# Altium schematic symbol library PCB_Project1.SCHLIB: 6 symbols
Pins are listed as number, name and electrical type; pins without a type are passive.

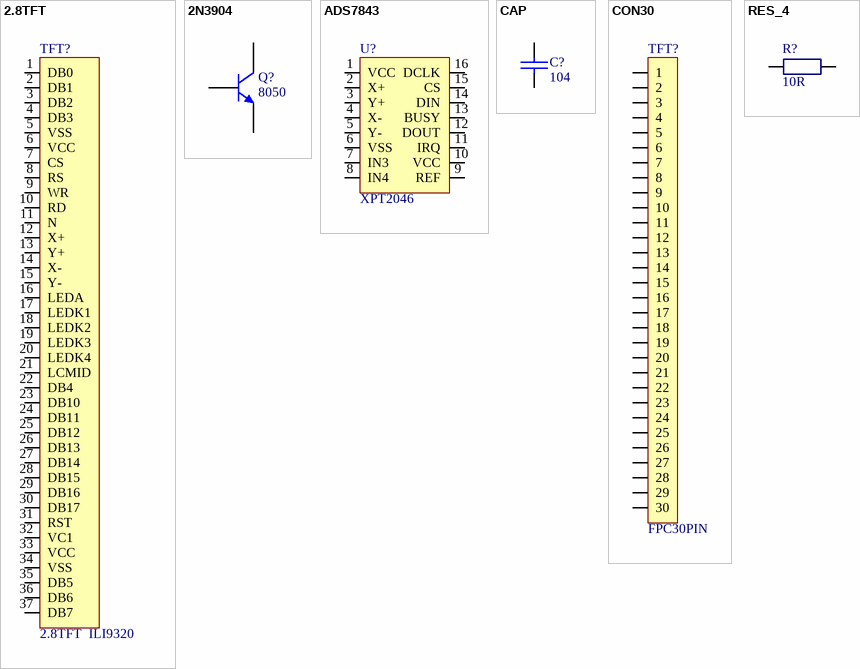
[diagram p0: symbols 2.8TFT to RES_4]

## 2.8TFT
designator TFT?, comment 2.8TFT  ILI9320
pins: 1 DB0, 2 DB1, 3 DB2, 4 DB3, 5 VSS, 6 VCC, 7 CS, 8 RS, 9 WR, 10 RD, 11 N, 12 X+, 13 Y+, 14 X-, 15 Y-, 16 LEDA, 17 LEDK1, 18 LEDK2, 19 LEDK3, 20 LEDK4, 21 LCMID, 22 DB4, 23 DB10, 24 DB11, 25 DB12, 26 DB13, 27 DB14, 28 DB15, 29 DB16, 30 DB17, 31 RST, 32 VC1, 33 VCC, 34 VSS, 35 DB5, 36 DB6, 37 DB7

## 2N3904
designator Q?, comment 8050
NPN General Purpose Amplifier; Published: 8-Jun-2000; LatestRevisionDate: 15-Jan-2003; LatestRevisionNote: PCB Footprint 'BCY-W3/D4.7' replaced; DatasheetVersion: 1997; PackageVersion: Sep-1998; PackageReference: TO-92A; Publisher: Altium Limited; Code_JEDEC: TO-92A; ComponentLink1Description: Manufacturer Link; ComponentLink1URL: http://www.fairchildsemi.com/; ComponentLink2Description: Datasheet; ComponentLink2URL: http://www.fairchildsemi.com/ds/2N%2F2N3904.pdf
footprint BCY-W3/E4 (TO, Flat Index; 3 In-Line, Axial Leads; Body Dia. 4.5mm; Leads 0.51 x 0.48 mm (max))
simulation model 2N3904 (NPN)
signal-integrity model 2N3904
pins: 1 E, 2 B, 3 C

## ADS7843
designator U?, comment XPT2046
pins: 1 VCC, 2 X+, 3 Y+, 4 X-, 5 Y-, 6 VSS, 7 IN3, 8 IN4, 9 REF, 10 VCC, 11 IRQ, 12 DOUT, 13 BUSY, 14 DIN, 15 CS, 16 DCLK

## CAP
designator C?, comment 104
Capacitor
footprint C0603
pins: 1, 2

## CON30
designator TFT?, comment FPC30PIN
footprint FPC0.5 2H-WS-30P (长：19.2mm，宽：5.2mm，高：2mm)
pins: 1, 2, 3, 4, 5, 6, 7, 8, 9, 10, 11, 12, 13, 14, 15, 16, 17, 18, 19, 20, 21, 22, 23, 24, 25, 26, 27, 28, 29, 30

## RES_4
designator R?, comment 10R
footprint R0603
footprint R0805
footprint FUSE3216X08M (Chip Fuse, 2-Leads, Body 3.20x1.60mm, IPC Low Density)
pins: 1, 2
2 alternate drawings of the same symbol